# EAGLE library part HDR-1X06 (library connectors)
Pin header 1 x 6
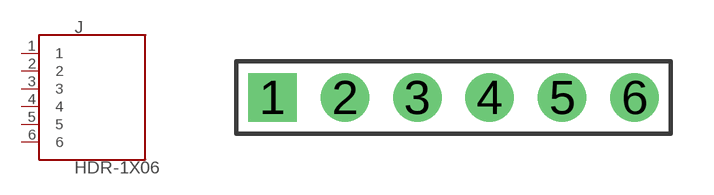
[diagram p0: symbol with the pads of HDR-1X06; footprint HDR-1X06]

Designator prefix J

## HDR-1X06  [HDR-1X06]
1  1  pas
2  2  pas
3  3  pas
4  4  pas
5  5  pas
6  6  pas

## Footprint HDR-1X06 (pad centres in mm)
Pin header, 1 row of 6, pitch 2.54 mm. Sizes: 0.1 inch (2.54 mm) pin strip grid; pads worked out for this kit. Not verified against a datasheet.
drill 1 pad 1.7 square: 1 -6.35,0
drill 1 pad 1.7: 2 -3.81,0; 3 -1.27,0; 4 1.27,0; 5 3.81,0; 6 6.35,0